# Altium footprint library PQFN50P250X300X86-14N.PcbLib: 1 footprints
Each footprint in its own frame and in the unit in brackets; x right, y up, seen from the top. Pads: shape width x height; smd on the part's side, far side on the other; paste and mask are expansions set on the pad; w line width, h text height; cw(c..) or ccw(c..) is an arc to the next point about the centre after c.
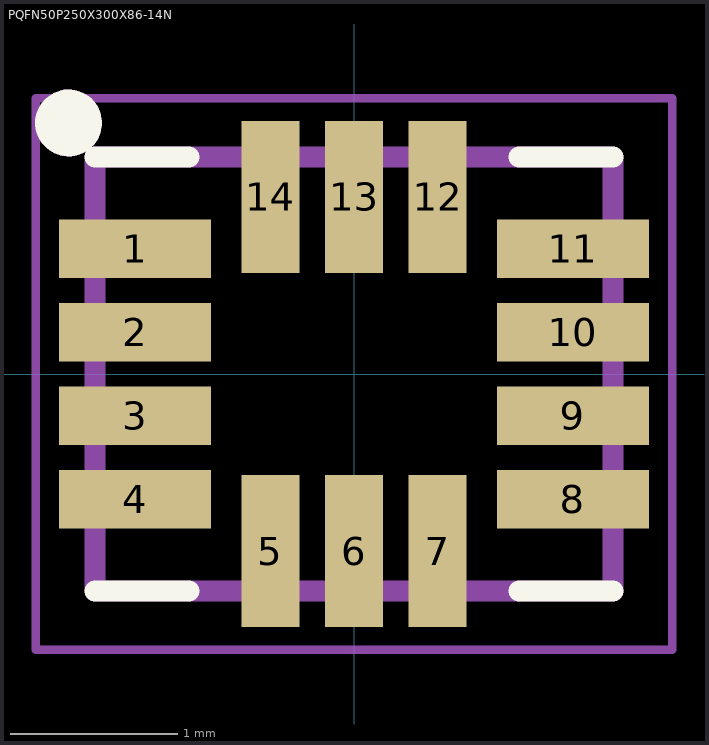
[diagram p0: the footprint, top view; thin cyan lines are the x and y axes]

## PQFN50P250X300X86-14N [mm]
pads (14):
  rect 0.91x0.35 smd mask+0.05: 1(-1.31,0.75) 2(-1.31,0.25) 3(-1.31,-0.25) 4(-1.31,-0.75) 8(1.31,-0.75) 9(1.31,-0.25) 10(1.31,0.25) 11(1.31,0.75)
  rect 0.35x0.91 smd mask+0: 5(-0.5,-1.06) 6(0,-1.06) 7(0.5,-1.06) 12(0.5,1.06) 13(0,1.06) 14(-0.5,1.06)
Top Overlay:
  circle w0.2: c-1.709,1.503 r0.1
  lines w0.127: -1.55,-1.3 -0.99,-1.3 ; -1.55,1.3 -0.99,1.3 ; 0.99,-1.3 1.55,-1.3 ; 0.99,1.3 1.55,1.3
Top Solder:
  region: 0.225,-1.57 -0.225,-1.57 -0.225,-0.56 0.225,-0.56
  region: -0.275,-1.57 -0.725,-1.57 -0.725,-0.56 -0.275,-0.56
  region: 0.725,-1.57 0.275,-1.57 0.275,-0.56 0.725,-0.56
  region: 0.225,0.56 -0.225,0.56 -0.225,1.57 0.225,1.57
  region: 0.725,0.56 0.275,0.56 0.275,1.57 0.725,1.57
  region: -0.275,0.56 -0.725,0.56 -0.725,1.57 -0.275,1.57
Assembly Top:
  circle w0.2: c-1.709,1.503 r0.1
  lines w0.127: -1.55,-1.3 1.55,-1.3 1.55,1.3 -1.55,1.3 -1.55,-1.3
Courtyard Top:
  lines w0.05: -1.905,-1.651 1.905,-1.651 1.905,1.651 -1.905,1.651 -1.905,-1.651
3D body "step_temp.STEP": height 0.86, standoff 0, extent -1.5,-1.25 1.5,1.25